# Altium schematic symbol library Altium_Socket.SchLib: 2 symbols
Pins are listed as number, name and electrical type; pins without a type are passive.

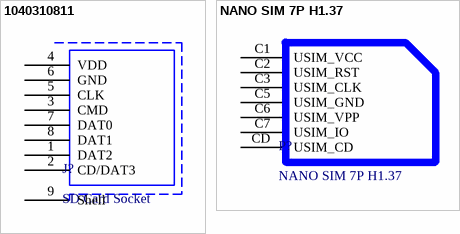
[diagram p0: symbols 1040310811 to NANO SIM 7P H1.37]

## 1040310811
designator J?, comment SD Card Socket
CONN MICRO SD CARD (TF CARD) SMD PUSH-PULL; Manufacturer Part Number: 1040310811; Manufacturer: MOLEX; Pad Count: 14; Value: 1040310811; ComponentLink1Description: Datasheet; ComponentLink1URL: https://www.lcsc.com/datasheet/C585350.pdf?spm=wm.sxq.inf.ggs___wm.fly.bg.16.xh&lcsc_vid=FlkIUABWQVJeAgZfQwdWUlcFT1ZYUV1ST1deUwVWQ1IxVlNfQ1heUVBRTlVYXjsOAxUeFF5JWBYZEEoKFBINSQcJGk4%3D; Insertion - Extraction: Push-Pull; LCSC Part #: C585350; Mount: SMD/SMT; Operating Temperature Max: + 85 C; Operating Temperature Min: - 25 C; Packaging: Tape and Reel; Supplier 1 Part Number: 538-104031-0811; Supplier 1 URL: https://www.mouser.vn/en/ProductDetail/Molex/104031-0811?qs=udsGRKD4nA3Tvy7wqky%252BuA%3D%3D&srsltid=AYCX9vL6_Ow5dtIWoxN33sF6frz26Z5_jCXz6L4Fbqi2EORWCKd8NQxk; Supplier 1: Mouser; Supplier 2 Part Number: WM6357TR-ND; Supplier 2 URL: https://www.digikey.com/en/products/detail/molex/1040310811/2370379; Supplier 2: Digi-Key; Supplier 3 Part Number: N/A; Supplier 3 URL: N/A; Supplier 3: thegioiic; Supply Voltage - Max: N/A; Supply Voltage - Min: N/A
footprint 1040310811
pins: 1 DAT2, 2 CD/DAT3, 3 CMD, 4 VDD, 5 CLK, 6 GND, 7 DAT0, 8 DAT1, 9 Shell

## NANO SIM 7P H1.37
designator P?
Brass Alloy Self-bouncing Gold 1.37mm Card Slot -40℃~+70℃ Nano SIM card SMD SIM Card Connectors ROHS; Manufacturer: SHOU HAN; Pad Count: 7; Insertion - Extraction: Push-Push; LCSC Part #: C7529384; ComponentLink1Description: Datasheet; ComponentLink1URL: https://www.lcsc.com/datasheet/lcsc_datasheet_2308181409_SHOU-HAN-NANO-SIM-7P-H1-37_C7529384.pdf; Manufacturer Part Number: NANO SIM 7P H1.37; Mount: SMD/SMT; Operating Temperature Max: + 70 C; Operating Temperature Min: - 40 C; Packaging: Tape and Reel; Supplier 1: Mouser; Supplier 1 Part Number: N/A; Supplier 1 URL: N/A; Supplier 2: Digi-Key; Supplier 2 Part Number: N/A; Supplier 2 URL: N/A; Supplier 3: thegioiic; Supplier 3 Part Number: N/A; Supplier 3 URL: N/A; Supply Voltage - Max: N/A; Supply Voltage - Min: N/A; Value: NANO SIM 7P H1.37
footprint NANO SIM 7P H1.37
pins: C1 USIM_VCC, C2 USIM_RST, C3 USIM_CLK, C5 USIM_GND, C6 USIM_VPP, C7 USIM_IO, CD USIM_CD